# Altium footprint library Miscellaneous.PcbLib: 3 footprints
Each footprint in its own frame and in the unit in brackets; x right, y up, seen from the top. Pads: shape width x height; smd on the part's side, far side on the other; paste and mask are expansions set on the pad; w line width, h text height; cw(c..) or ccw(c..) is an arc to the next point about the centre after c.
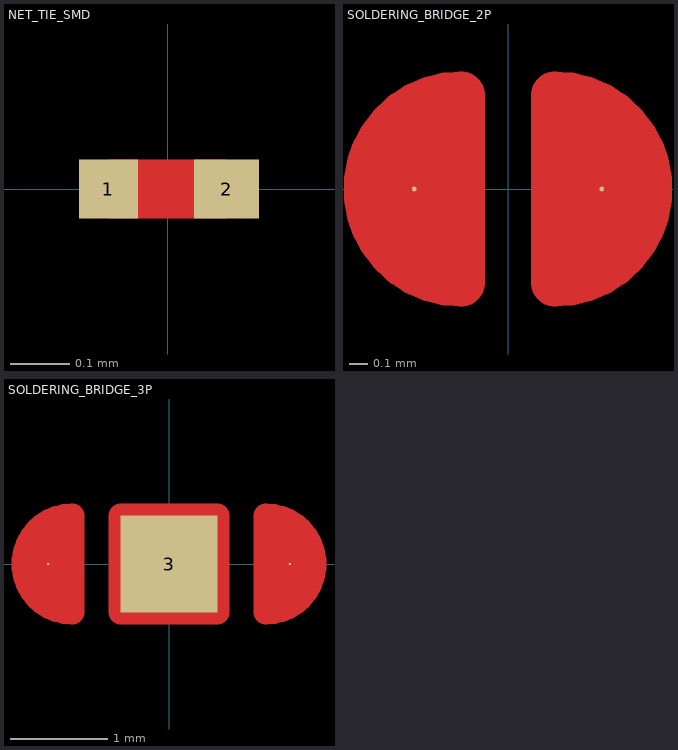
[diagram p0: the footprints below, top view; thin cyan lines are the x and y axes]

## NET_TIE_SMD [mm]
pads (2):
  rect 0.1x0.1 smd mask+0: 1(-0.1,0)
  rect 0.11x0.1 smd mask+0: 2(0.1,0)
Top Layer:
  rectangle: -0.1,-0.05 0.1,0.05

## SOLDERING_BRIDGE_2P [mil]
pads (2):
  round 1 smd: 1(-19.68,0) 2(19.68,0)
Top Layer:
  region: 9.84,-19.68 9.84,19.68 11.78,19.68 15.58,18.93 19.17,17.44 22.39,15.29 25.13,12.55 27.29,9.32 28.77,5.74 29.53,1.94 29.53,-1.94 28.77,-5.74 27.29,-9.32 25.13,-12.55 22.39,-15.29 19.17,-17.44 15.58,-18.93 11.78,-19.68
  region: -9.84,-19.68 -11.78,-19.68 -15.58,-18.93 -19.17,-17.44 -22.39,-15.29 -25.13,-12.55 -27.29,-9.32 -28.77,-5.74 -29.53,-1.94 -29.53,1.94 -28.77,5.74 -27.29,9.32 -25.13,12.55 -22.39,15.29 -19.17,17.44 -15.58,18.93 -11.78,19.68 -9.84,19.68
  lines w10: -9.84,-19.68 cw(c-9.84,0) -9.84,19.68 -9.84,-19.68 ; 9.84,-19.68 ccw(c9.84,0) 9.84,19.68 9.84,-19.68
Top Solder:
  region: -9.84,-19.68 9.84,-19.68 13.76,-19.68 20.99,-16.69 26.53,-11.15 29.53,-3.92 29.53,3.92 26.53,11.15 20.99,16.69 13.76,19.68 9.84,19.68 -9.84,19.68 -13.76,19.68 -20.99,16.69 -26.53,11.15 -29.53,3.92 -29.53,-3.92 -26.53,-11.15 -20.99,-16.69 -13.76,-19.68
  lines w10: -9.84,-21.65 cw(c-9.84,0) -9.84,21.65 9.84,21.65 cw(c9.84,0) 9.84,-21.65 -9.84,-21.65

## SOLDERING_BRIDGE_3P [mm]
pads (3):
  round 0.025 smd: 1(-1.25,0) 2(1.25,0)
  rect 1x1 smd: 3(0,0)
Top Layer:
  region: -1,-0.5 -1.049,-0.5 -1.146,-0.481 -1.237,-0.443 -1.319,-0.388 -1.388,-0.319 -1.443,-0.237 -1.481,-0.146 -1.5,-0.049 -1.5,0.049 -1.481,0.146 -1.443,0.237 -1.388,0.319 -1.319,0.388 -1.237,0.443 -1.146,0.481 -1.049,0.5 -1,0.5
  region: 1,-0.5 1,0.5 1.049,0.5 1.146,0.481 1.237,0.443 1.319,0.388 1.388,0.319 1.443,0.237 1.481,0.146 1.5,0.049 1.5,-0.049 1.481,-0.146 1.443,-0.237 1.388,-0.319 1.319,-0.388 1.237,-0.443 1.146,-0.481 1.049,-0.5
  lines w0.254: -1,-0.5 cw(c-1,0) -1,0.5 -1,-0.5 ; -0.5,-0.5 -0.5,0.5 0.5,0.5 0.5,-0.5 -0.5,-0.5 ; 1,-0.5 ccw(c1,0) 1,0.5 1,-0.5
Top Solder:
  region: -0.95,-0.5 1,-0.5 1.099,-0.5 1.283,-0.424 1.424,-0.283 1.5,-0.099 1.5,0.099 1.424,0.283 1.283,0.424 1.099,0.5 1,0.5 -0.95,0.5 -1.049,0.5 -1.233,0.424 -1.374,0.283 -1.45,0.099 -1.45,-0.099 -1.374,-0.283 -1.233,-0.424 -1.049,-0.5
  lines w0.254: -1,-0.55 cw(c-1,0) -1,0.55 1,0.55 cw(c1,0) 1,-0.55 -1,-0.55